# Altium schematic symbol library Transformer.SchLib: 8 symbols
Pins are listed as number, name and electrical type; pins without a type are passive.

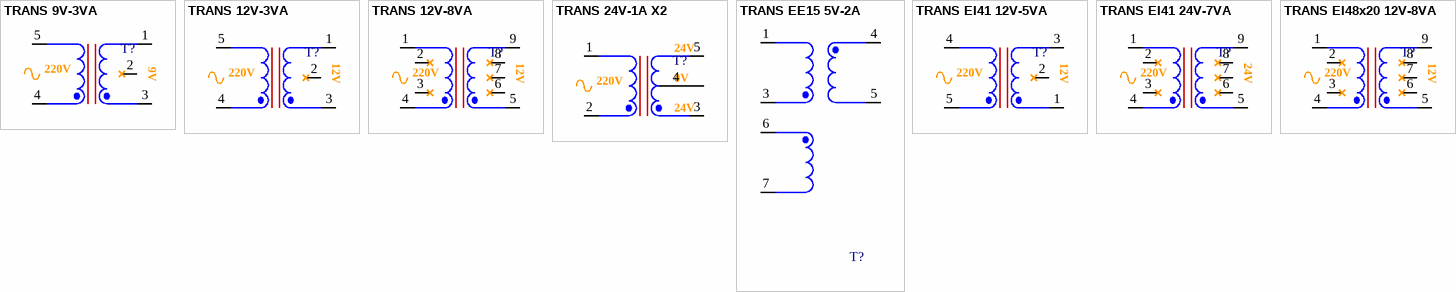
[diagram p0: symbols TRANS 9V-3VA to TRANS EI48x20 12V-8VA]

## TRANS 9V-3VA
designator T?, comment 9V-3VA  (value not drawn)
Transformer, 3VA 13x15mm; Designed by: TranLuyen; Code: N/A
footprint EI13x15 12V 3VA (42*35*30)
footprint EI13x15 12V 3VA mix 5VA (42*35*30)
pins: 1, 2, 3, 4, 5
text: 9V; 220V

## TRANS 12V-3VA
designator T?, comment 12V-3VA  (value not drawn)
Transformer, 12V 3VA; Code: 1307-004; Designed by: TranLuyen
footprint EI13x15 12V 3VA (42*35*30)
footprint EI13x15 12V 3VA mix 5VA (42*35*30)
pins: 1, 2, 3, 4, 5
text: 12V; 220V

## TRANS 12V-8VA
designator T?, comment 12V-8VA  (value not drawn)
Transformer, 12V 8VA; Code: 1307-002; Designed by: TranLuyen
footprint EI41x26 (41*33*46)
pins: 1, 2, 3, 4, 5, 6, 7, 8, 9
text: 12V; 220V

## TRANS 24V-1A X2
designator T?, comment 24V-1A-X2  (value not drawn)
Transformer, 24V 1A X2; Designed by: TranLuyen; Code: N/A
footprint TRANS 24V-1A-x2
pins: 1, 2, 3, 4, 5
text: 24V; 220V; 0V

## TRANS EE15 5V-2A
designator T?, comment 24V-7VA  (value not drawn)
Transformer EE15 6 PIN; Code: N/A
footprint EE15
pins: 1, 3, 4, 5, 6, 7

## TRANS EI41 12V-5VA
designator T?, comment 12V-5VA  (value not drawn)
Transformer EI41x20 5 PIN; Code: N/A; ComponentLink1Description: Datasheet; ComponentLink1URL: https://item.taobao.com/item.htm?id=647743353881&pisk=fdmmnpOKQqzfv-7uEUrX7r4spm88GtZ_sfIT6lFwz7P5DfEYXuzzpJBV_Sy4a4DIsSp6lo3usblugfD6hRPZ_fVtkUKKhxZ_bBEMvHHXPXTUxjV437JadJIV_Z1B8xZ_bCApvHHjhXyMXaUaQ8JuBRFa3fzaauP7IlS47i7Pa7Nz_lza7uSzpJeN7iywEayQdsSagSSza-w43lrZ_zlR8GPnb0iyMllvWonpNm20o5bYZGD-cMUzT6PRjGV0erXx37jNb008gq78ge681oFj3-c6AiZ4SVoY4mRybkuIZc4UxFpbuA0o1onyQZPEkjUtczfVuJq0iyo48hIiKPuoqon21wM-ESz324LWMPEmi2NQuUOSsYVx_m4PiQFtJYn4rXRRqfai7mEr0Q-h4GQP88qhf8Jt4N__u8wu96lQ-JrO2YqDELbBlry7HBpkEN__u8wu9LvlRsa4F-dd.&skuId=4817968380179&spm=a21xtw.29178619.product_shelf.1.140f7265KmWoiU
footprint EI41x20 (41*33*46)
pins: 1, 2, 3, 4, 5
text: 12V; 220V

## TRANS EI41 24V-7VA
designator T?, comment 24V-7VA  (value not drawn)
Transformer EI13X26 9 PIN; Designed by: TranLuyen; Code: N/A; ComponentLink1Description: Datasheet; ComponentLink1URL: https://github.com/TranLuyen-dev/Datasheets/raw/main/Transformer/EI41%2013X26%209PIN.doc
footprint EI41x26 (41*33*46)
pins: 1, 2, 3, 4, 5, 6, 7, 8, 9
text: 24V; 220V

## TRANS EI48x20 12V-8VA
designator T?, comment 12V-8VA  (value not drawn)
Transformer, EI48x20 8VA; Designed by: TranLuyen; Code: N/A
footprint EI48x20 8W (48*40*36 mm)
pins: 1, 2, 3, 4, 5, 6, 7, 8, 9
text: 12V; 220V